# Altium footprint library PcbLib1.PcbLib: 332 footprints (part 1 of 22)
Each footprint in its own frame and in the unit in brackets; x right, y up, seen from the top. Pads: shape width x height; smd on the part's side, far side on the other; paste and mask are expansions set on the pad; w line width, h text height; cw(c..) or ccw(c..) is an arc to the next point about the centre after c.
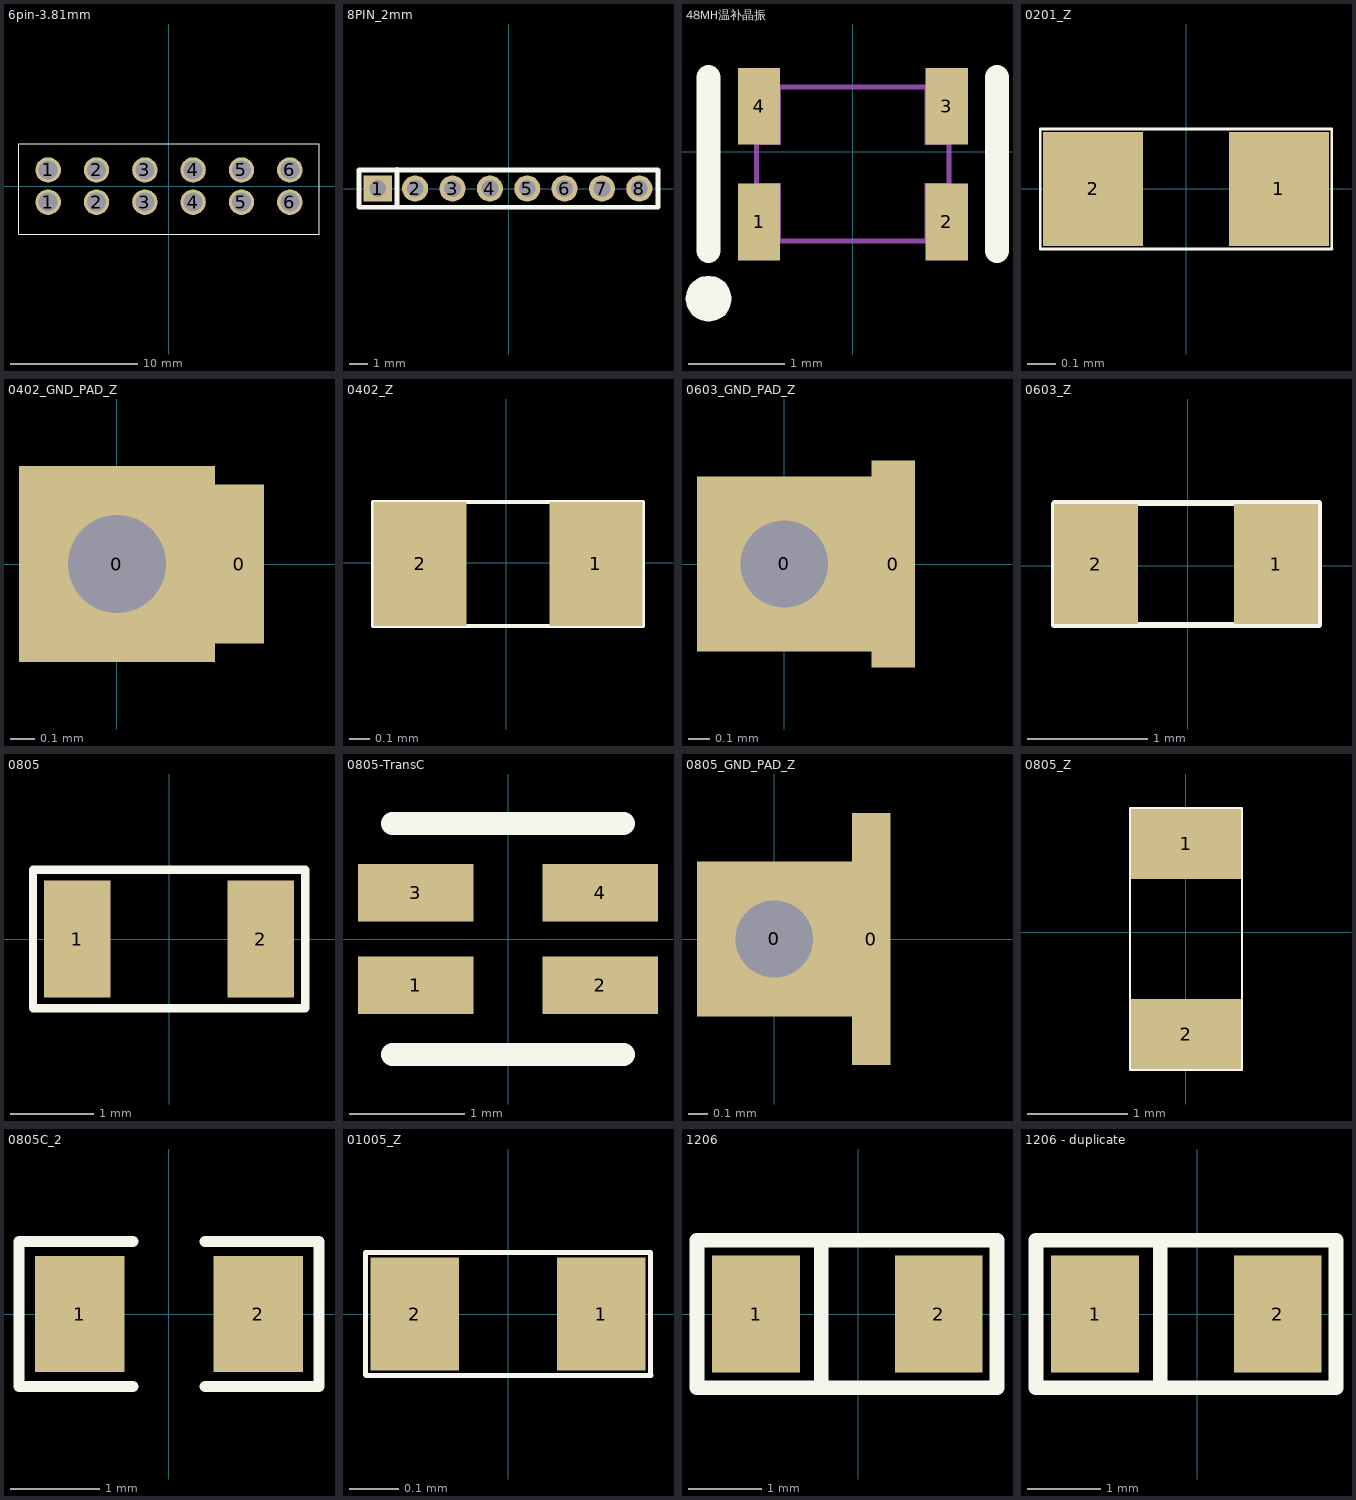
[diagram p0: the footprints below, top view; thin cyan lines are the x and y axes]

## 6pin-3.81mm [mm]
pads (12):
  round 2 hole 1.5 paste-2539.97 mask+0.051: 1(-9.525,-1.27) 1(-9.525,1.27) 2(-5.715,-1.27) 2(-5.715,1.27) 3(-1.905,-1.27) 3(-1.905,1.27) 4(1.905,-1.27) 4(1.905,1.27) 5(5.715,-1.27) 5(5.715,1.27) 6(9.525,-1.27) 6(9.525,1.27)
Top Overlay:
  lines w0.05: -11.825,-3.81 11.825,-3.81 11.825,3.35 -11.825,3.35 -11.825,-3.81

## 8PIN_2mm [mm]
pads (8):
  rect 1.524x1.4 hole 0.9: 1(-7,0)
  round 1.4 hole 0.9: 2(-5,0) 3(-3,0) 4(-1,0) 5(1,0) 6(3,0) 7(5,0) 8(7,0)
Top Overlay:
  lines w0.254: -5.969,-0.889 -5.969,1.016 ; -8,-1 -8,1 8,1 8,-1 -8,-1
Mechanical 6:
  lines w0.051: -8,-1 8,-1 8,1 -8,1 -8,-1
Mechanical 8:
  region: -7.94,-1 -7.94,-1.025 -7.975,-1.06 -8.025,-1.06 -8.06,-1.025 -8.06,-1 -8.06,-0.975 -8.025,-0.94 -7.975,-0.94 -7.94,-0.975 -7.94,-1
Mechanical 9:
  region: 6.75,0.25 7.25,0.25 7.25,-0.25 6.75,-0.25
  region: 4.75,0.25 5.25,0.25 5.25,-0.25 4.75,-0.25
  region: 2.75,0.25 3.25,0.25 3.25,-0.25 2.75,-0.25
  region: 0.75,0.25 1.25,0.25 1.25,-0.25 0.75,-0.25
  region: -1.25,0.25 -0.75,0.25 -0.75,-0.25 -1.25,-0.25
  region: -3.25,0.25 -2.75,0.25 -2.75,-0.25 -3.25,-0.25
  region: -5.25,0.25 -4.75,0.25 -4.75,-0.25 -5.25,-0.25
  region: -7.25,0.25 -6.75,0.25 -6.75,-0.25 -7.25,-0.25

## 48MH温补晶振 [mil] "YSO510TP 48MHZ 3.3V ±1.5PPM -30~85℃ (±0.5PPM) Clipped Sine Wave"
pads (4):
  rect 17.3x31.5 smd: 1(-38.4,-28.6) 2(38.4,-28.6) 3(38.4,18.7) 4(-38.4,18.7)
Top Overlay:
  lines w9.4: -63.8,-60.1 -63.4,-61.9 -62.4,-63.4 -60.9,-64.4 -59.1,-64.8 -57.3,-64.4 -55.7,-63.4 -54.7,-61.9 -54.4,-60.1 -54.7,-58.3 -55.7,-56.7 -57.3,-55.7 -59.1,-55.4 -60.9,-55.7 -62.4,-56.7 -63.4,-58.3 -63.8,-60.1
  lines w10: -59.1,-40.4 -59.1,30.5 ; 59,-40.4 59,30.5
Mechanical 6:
  lines w2: -39.4,-36.5 39.3,-36.5 39.3,26.5 -39.4,26.5 -39.4,-36.5
Mechanical 8:
  region: -37,-36.5 -37.4,-37.7 -38.4,-38.6 -39.7,-38.8 -40.9,-38.2 -41.7,-37.1 -41.7,-35.8 -40.9,-34.7 -39.7,-34.1 -38.4,-34.3 -37.4,-35.2
Mechanical 9:
  region: -39.4,2.9 -39.4,26.5 -29.6,26.5 -29.6,2.9
  region: -39.4,-36.5 -39.4,-12.8 -29.6,-12.8 -29.6,-36.5
  region: 39.3,26.5 39.3,2.9 29.5,2.9 29.5,26.5
  region: 39.3,-12.8 39.3,-36.5 29.5,-36.5 29.5,-12.8

## 0201_Z [mm]
pads (2):
  rect 0.35x0.4 smd mask+0.051: 1(0.325,0) 2(-0.325,0)
Top Overlay:
  lines w0.01: -0.51,-0.211 -0.51,0.21 0.509,0.21 0.51,0.209 0.51,-0.21 -0.51,-0.21
3D body: height 1.3, standoff 0, extent -0.467,-0.213 0.451,0.213

## 0402_GND_PAD_Z [mm]
pads (2):
  rect 0.8x0.8 smd mask+0.051: 0(0,0)
  rect 0.2x0.65 smd mask+0.051: 0(0.5,0)
via 0,0 diameter 0.6 hole 0.4

## 0402_Z [mm]
pads (2):
  rect 0.45x0.6 smd mask+0: 1(0.434,-0.006) 2(-0.416,-0.006)
Top Overlay:
  lines w0.02: 0.662,-0.306 -0.644,-0.306 -0.644,0.294 0.661,0.294 ; 0.662,-0.305 0.662,0.289

## 0603_GND_PAD_Z [mm]
pads (2):
  rect 0.8x0.8 smd mask+0.051: 0(0,0)
  rect 0.2x0.95 smd mask+0.051: 0(0.5,0)
via 0,0 diameter 0.6 hole 0.4

## 0603_Z [mm]
pads (2):
  rect 0.7x1 smd mask+0: 1(0.735,0.013) 2(-0.765,0.013)
Top Overlay:
  lines w0.05: -1.115,-0.493 -1.115,0.516 ; -1.111,-0.494 1.095,-0.494 1.095,0.522 -1.111,0.522

## 0805 [mm]
height 6.86
pads (2):
  rect 0.8x1.4 smd: 1(-1.1,0) 2(1.1,0)
Top Overlay:
  lines w0.1: -1.632,-0.831 1.635,-0.831 1.635,0.832 -1.632,0.832 -1.632,-0.831

## 0805-TransC [mm] "Mini-5pin USB 1:1变压器"
pads (4):
  rect 1x0.5 smd: 1(-0.8,-0.4) 2(0.8,-0.4) 3(-0.8,0.4) 4(0.8,0.4)
Top Overlay:
  lines w0.2: -1,-1 1,-1 ; -1,1 1,1

## 0805_GND_PAD_Z [mm]
pads (2):
  rect 0.8x0.8 smd mask+0.051: 0(0,0)
  rect 0.2x1.3 smd mask+0.051: 0(0.5,0)
via 0,0 diameter 0.6 hole 0.4

## 0805_Z [mm]
pads (2):
  rect 1.1x0.7 smd mask+0: 1(0.001,0.882) 2(0.001,-1.018)
Top Overlay:
  lines w0.02: -0.56,-1.378 0.56,-1.378 0.561,-1.377 0.561,1.242 -0.558,1.242 -0.559,1.241 -0.559,-1.378

## 0805C_2 [mm]
pads (2):
  rect 1x1.3 smd: 1(-1,0) 2(1,0)
Top Overlay:
  lines w0.127: -0.406,-0.81 -1.676,-0.81 -1.676,0.81 -0.406,0.81 ; 0.406,-0.81 1.676,-0.81 1.676,0.81 0.406,0.81

## 01005_Z [mm]
pads (2):
  rect 0.18x0.23 smd mask+0.051: 1(0.19,0) 2(-0.19,0)
Top Overlay:
  lines w0.01: -0.29,-0.124 -0.29,0.125 ; -0.289,-0.125 0.291,-0.125 ; -0.288,0.125 0.29,0.125 0.29,-0.123
3D body: height 1.3, standoff 0, extent -0.249,-0.079 0.249,0.079

## 1206 [mm]
pads (2):
  rect 1.2x1.6 smd: 1(-1.4,0) 2(1.1,0)
Top Overlay:
  lines w0.2: -0.508,-1.007 -0.508,1.01 ; -2.208,-1.007 1.9,-1.007 1.9,1.01 -2.208,1.01 -2.208,-1.007

## 1206 - duplicate [mm]
pads (2):
  rect 1.2x1.6 smd: 1(-1.4,0) 2(1.1,0)
Top Overlay:
  lines w0.2: -0.508,-1.007 -0.508,1.01 ; -2.208,-1.007 -2.208,1.01 1.9,1.01 1.9,-1.007 -2.208,-1.007